# Altium schematic symbol library S56_MLD_tiny.SchLib: 8 symbols
Pins are listed as number, name and electrical type; pins without a type are passive.

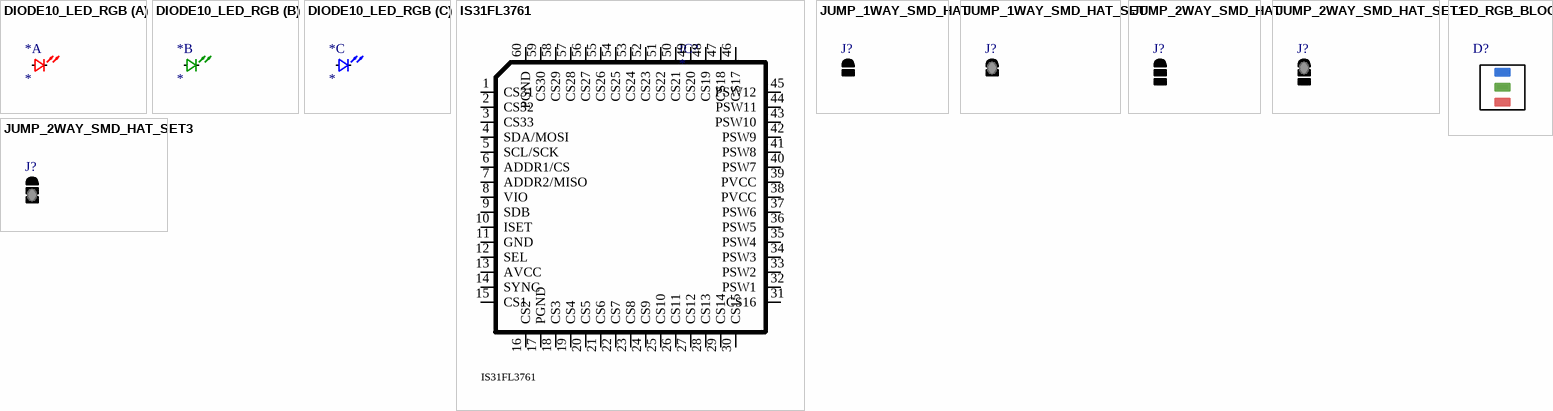
[diagram p0: symbols DIODE10_LED_RGB to LED_RGB_BLOCK]

## DIODE10_LED_RGB
designator *
footprint D0404G (e.g. EAST10105RGBA0 or SMLP34RGB RGB led); pin to pad B>3 CA>1 G>4 R>2
part A pins: CA, R
part B pins: CA, G
part C pins: B, CA

## IS31FL3761
designator IC?  Part: IS31FL3761
IS31FL3761 in QFN-60
footprint TQFP-44 (Footprint not found)
footprint QFN-60 (Footprint not found)
pins: 0 HEAT_SLUG, 1 CS31, 2 CS32, 3 CS33, 4 SDA/MOSI, 5 SCL/SCK, 6 ADDR1/CS, 7 ADDR2/MISO, 8 VIO, 9 SDB, 10 ISET, 11 GND, 12 SEL, 13 AVCC, 14 SYNC, 15 CS1, 16 CS2, 17 PGND, 18 CS3, 19 CS4, 20 CS5, 21 CS6, 22 CS7, 23 CS8, 24 CS9, 25 CS10, 26 CS11, 27 CS12, 28 CS13, 29 CS14, 30 CS15, 31 CS16, 32 PSW1, 33 PSW2, 34 PSW3, 35 PSW4, 36 PSW5, 37 PSW6, 38 PVCC, 39 PVCC, 40 PSW7, 41 PSW8, 42 PSW9, 43 PSW10, 44 PSW11, 45 PSW12, 46 CS17, 47 CS18, 48 CS19, 49 CS20, 50 CS21, 51 CS22, 52 CS23, 53 CS24, 54 CS25, 55 CS26, 56 CS27, 57 CS28, 58 CS29, 59 CS30, 60 PGND, 61 GND

## JUMP_1WAY_SMD_HAT
designator J?
footprint JUMP_1W_MICRO_ARROW (Replacement for JUMP_1W_MICRO, 0.11mm gap)
footprint JUMP_1W_MICRO_HAT
pins: 1, 2

## JUMP_1WAY_SMD_HAT_SET
designator J?
footprint JUMP_1W_MICRO_ARROW (Replacement for JUMP_1W_MICRO, 0.11mm gap)
footprint JUMP_1W_MICRO_ARROW_WIRED (Replacement for JUMP_1W_MICRO, 0.11mm gap)
footprint JUMP_1W_MICRO_ARROW_SOLDER (Replacement for JUMP_1W_MICRO, 0.11mm gap)
footprint JUMP_1W_MICRO_HAT
footprint JUMP_1W_MICRO_HAT_WIRED
footprint JUMP_1W_MICRO_HAT_SOLDER
pins: 1, 2

## JUMP_2WAY_SMD_HAT
designator J?
footprint JUMP_2W_MICRO_ARROW (Replacement for JUMP_2W_MICRO, 0.11mm gap)
footprint JUMP_2W_MICRO_HAT
pins: 1, 2, 3

## JUMP_2WAY_SMD_HAT_SET1
designator J?
footprint JUMP_2W_MICRO_ARROW (Replacement for JUMP_2W_MICRO, 0.11mm gap)
footprint JUMP_2W_MICRO_ARROW_WIRED1 (Replacement for JUMP_2W_MICRO, 0.11mm gap)
footprint JUMP_2W_MICRO_ARROW_SOLDER1 (Replacement for JUMP_2W_MICRO, 0.11mm gap)
footprint JUMP_2W_MICRO_HAT
footprint JUMP_2W_MICRO_HAT_WIRED1
footprint JUMP_2W_MICRO_HAT_SOLDER1
pins: 1, 2, 3

## JUMP_2WAY_SMD_HAT_SET3
designator J?
footprint JUMP_2W_MICRO_ARROW (Replacement for JUMP_2W_MICRO, 0.11mm gap)
footprint JUMP_2W_MICRO_ARROW_WIRED3 (Replacement for JUMP_2W_MICRO, 0.11mm gap)
footprint JUMP_2W_MICRO_ARROW_SOLDER3 (Replacement for JUMP_2W_MICRO, 0.11mm gap)
footprint JUMP_2W_MICRO_HAT
footprint JUMP_2W_MICRO_HAT_WIRED3
footprint JUMP_2W_MICRO_HAT_SOLDER3
pins: 1, 2, 3

## LED_RGB_BLOCK
designator D?
footprint PLCC-4_2020
pins: 1 CA, 1 CA, 2 B, 2 B, 3 G, 3 G, 4 R, 4 R